# Altium schematic symbol library TPS61175PWPR.SchLib: 1 symbol
Pins are listed as number, name and electrical type; pins without a type are passive.

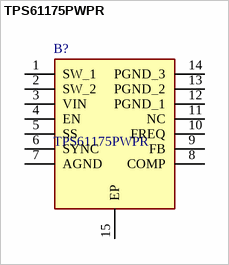
[diagram p0: symbol TPS61175PWPR]

## TPS61175PWPR
designator B?
TEXAS INSTRUMENTS - TPS61175PWPR - DC-DC Switching Boost Step Up Regulator, Adjustable, 2.9V-18Vin, 2.2 MHz, 3Aout, HTSSOP-14; Geometry.Height: 1.2mm; Manufacturer_Name: Texas Instruments; Manufacturer_Part_Number: TPS61175PWPR; Mouser Part Number: 595-TPS61175PWPR; Mouser Price/Stock: https://www.mouser.co.uk/ProductDetail/Texas-Instruments/TPS61175PWPR?qs=7IaIRco65pm0zx%252BYYPF1CQ%3D%3D; Arrow Part Number: TPS61175PWPR; Arrow Price/Stock: https://www.arrow.com/en/products/tps61175pwpr/texas-instruments?utm_currency=USD&region=nac; Datasheet Link: https://www.ti.com/lit/ds/symlink/tps61175.pdf?ts=1643090524950&ref_url=https%253A%252F%252Fwww.ti.com%252Fstore%252Fti%252Fen%252Fp%252Fproduct%252F%253Fp%253DTPS61175PWPR
footprint SOP65P640X120-15N
pins: 1 SW_1, 2 SW_2, 3 VIN, 4 EN, 5 SS, 6 SYNC, 7 AGND, 8 COMP, 9 FB, 10 FREQ, 11 NC, 12 PGND_1, 13 PGND_2, 14 PGND_3, 15 EP